# Altium integrated library FG26X7R1E106KRT00.IntLib: 1 symbol
Pins are listed as number, name and electrical type; pins without a type are passive.

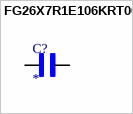
[diagram p0: symbol FG26X7R1E106KRT00]

## FG26X7R1E106KRT00
designator C?
Cap Ceramic 10uF 25V X7R 10% Radial 5mm 125C; MF: TDK; MP: FG26X7R1E106KRT00; SnapEDA_Link: https://www.snapeda.com/parts/FG26X7R1E106KRT00/TDK/view-part/?ref=snap; Package: Radial TDK; Value: *; Check_prices: https://www.snapeda.com/parts/FG26X7R1E106KRT00/TDK/view-part/?ref=eda
footprint CAPRB500W50L550T350H600
pins: 1, 2